# Altium footprint library 24V转12V芯片_URA2412S-6WR3.PcbLib: 1 footprints
Each footprint in its own frame and in the unit in brackets; x right, y up, seen from the top. Pads: shape width x height; smd on the part's side, far side on the other; paste and mask are expansions set on the pad; w line width, h text height; cw(c..) or ccw(c..) is an arc to the next point about the centre after c.
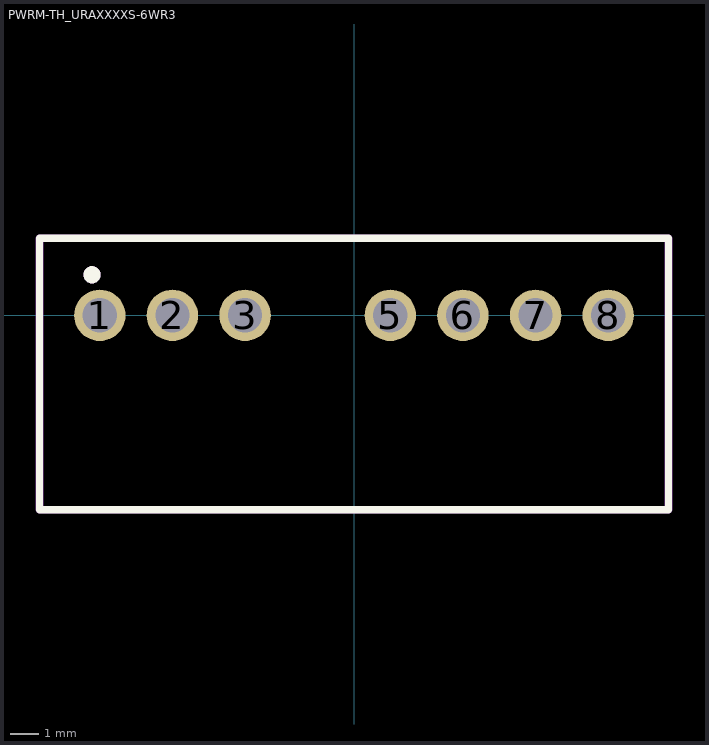
[diagram p0: the footprint, top view; thin cyan lines are the x and y axes]

## PWRM-TH_URAXXXXS-6WR3 [mm]
pads (7):
  round 1.8 hole 1.2: 1(-8.89,0) 2(-6.35,0) 3(-3.81,0) 5(1.27,0) 6(3.81,0) 7(6.35,0) 8(8.89,0)
Top Overlay:
  circle w0.3: c-9.161,1.42 r0.15
  lines w0.254: -11,-6.8 11,-6.8 11,2.7 -11,2.7 -11,-6.8
Mechanical 2:
  circle w0.3: c-9.161,1.42 r0.15
  region: -11.127,-6.8 -11.127,2.7 -11.117,2.749 -11.09,2.79 -11.049,2.817 -11,2.827 11,2.827 11.049,2.817 11.09,2.79 11.117,2.749 11.127,2.7 11.127,-6.8 11.117,-6.849 11.09,-6.89 11.049,-6.917 11,-6.927 10.951,-6.917 10.91,-6.89 10.883,-6.849 10.873,-6.8 10.873,2.573 -10.873,2.573 -10.873,-6.8 -10.883,-6.849 -10.91,-6.89 -10.951,-6.917 -11,-6.927 -11.049,-6.917 -11.09,-6.89 -11.117,-6.849
  region: 11,-6.927 -11,-6.927 -11.049,-6.917 -11.09,-6.89 -11.117,-6.849 -11.127,-6.8 -11.117,-6.751 -11.09,-6.71 -11.049,-6.683 -11,-6.673 11,-6.673 11.049,-6.683 11.09,-6.71 11.117,-6.751 11.127,-6.8 11.117,-6.849 11.09,-6.89 11.049,-6.917
Mechanical 6:
  lines w0.051: -11,-6.815 11,-6.815 11,2.685 -11,2.685 -11,-6.815
Mechanical 8:
  region: -10.94,-6.815 -10.94,-6.84 -10.975,-6.875 -11.025,-6.875 -11.06,-6.84 -11.06,-6.815 -11.06,-6.79 -11.025,-6.755 -10.975,-6.755 -10.94,-6.79 -10.94,-6.815
Mechanical 9:
  region: -8.54,0 -8.54,-0.07 -8.593,-0.198 -8.692,-0.297 -8.82,-0.35 -8.96,-0.35 -9.088,-0.297 -9.187,-0.198 -9.24,-0.07 -9.24,0 -9.24,0.07 -9.187,0.198 -9.088,0.297 -8.96,0.35 -8.82,0.35 -8.692,0.297 -8.593,0.198 -8.54,0.07 -8.54,0
  region: -6,0 -6,-0.07 -6.053,-0.198 -6.152,-0.297 -6.28,-0.35 -6.42,-0.35 -6.548,-0.297 -6.647,-0.198 -6.7,-0.07 -6.7,0 -6.7,0.07 -6.647,0.198 -6.548,0.297 -6.42,0.35 -6.28,0.35 -6.152,0.297 -6.053,0.198 -6,0.07 -6,0
  region: -3.46,0 -3.46,-0.07 -3.513,-0.198 -3.612,-0.297 -3.74,-0.35 -3.88,-0.35 -4.008,-0.297 -4.107,-0.198 -4.16,-0.07 -4.16,0 -4.16,0.07 -4.107,0.198 -4.008,0.297 -3.88,0.35 -3.74,0.35 -3.612,0.297 -3.513,0.198 -3.46,0.07 -3.46,0
  region: 1.62,0 1.62,-0.07 1.567,-0.198 1.468,-0.297 1.34,-0.35 1.2,-0.35 1.072,-0.297 0.973,-0.198 0.92,-0.07 0.92,0 0.92,0.07 0.973,0.198 1.072,0.297 1.2,0.35 1.34,0.35 1.468,0.297 1.567,0.198 1.62,0.07 1.62,0
  region: 9.24,0 9.24,-0.07 9.187,-0.198 9.088,-0.297 8.96,-0.35 8.82,-0.35 8.692,-0.297 8.593,-0.198 8.54,-0.07 8.54,0 8.54,0.07 8.593,0.198 8.692,0.297 8.82,0.35 8.96,0.35 9.088,0.297 9.187,0.198 9.24,0.07 9.24,0
  region: 6.7,0 6.7,-0.07 6.647,-0.198 6.548,-0.297 6.42,-0.35 6.28,-0.35 6.152,-0.297 6.053,-0.198 6,-0.07 6,0 6,0.07 6.053,0.198 6.152,0.297 6.28,0.35 6.42,0.35 6.548,0.297 6.647,0.198 6.7,0.07 6.7,0
  region: 4.16,0 4.16,-0.07 4.107,-0.198 4.008,-0.297 3.88,-0.35 3.74,-0.35 3.612,-0.297 3.513,-0.198 3.46,-0.07 3.46,0 3.46,0.07 3.513,0.198 3.612,0.297 3.74,0.35 3.88,0.35 4.008,0.297 4.107,0.198 4.16,0.07 4.16,0